# Altium footprint library DRV8849RHHR.PcbLib: 4 footprints
Each footprint in its own frame and in the unit in brackets; x right, y up, seen from the top. Pads: shape width x height; smd on the part's side, far side on the other; paste and mask are expansions set on the pad; w line width, h text height; cw(c..) or ccw(c..) is an arc to the next point about the centre after c.
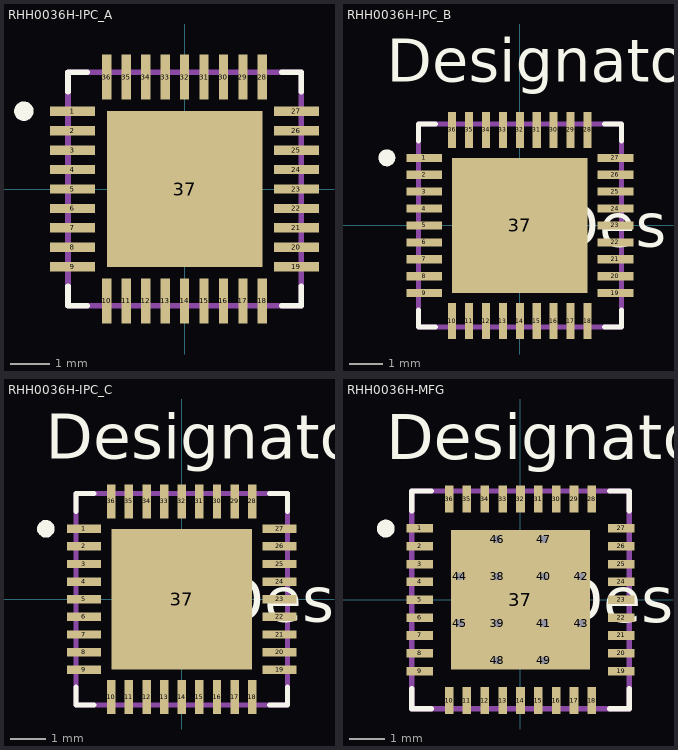
[diagram p0: the footprints below, top view; thin cyan lines are the x and y axes]

## RHH0036H-IPC_A [mm]
pads (37):
  rect 1.16x0.239 smd paste+0 mask+0: 1(-2.876,2) 2(-2.876,1.5) 3(-2.876,1) 4(-2.876,0.5) 5(-2.876,0) 6(-2.876,-0.5) 7(-2.876,-1) 8(-2.876,-1.5) 9(-2.876,-2) 19(2.876,-2) 20(2.876,-1.5) 21(2.876,-1) 22(2.876,-0.5) 23(2.876,0) 24(2.876,0.5) 25(2.876,1) 26(2.876,1.5) 27(2.876,2)
  rect 0.239x1.16 smd paste+0 mask+0: 10(-2,-2.876) 11(-1.5,-2.876) 12(-1,-2.876) 13(-0.5,-2.876) 14(0,-2.876) 15(0.5,-2.876) 16(1,-2.876) 17(1.5,-2.876) 18(2,-2.876) 28(2,2.876) 29(1.5,2.876) 30(1,2.876) 31(0.5,2.876) 32(0,2.876) 33(-0.5,2.876) 34(-1,2.876) 35(-1.5,2.876) 36(-2,2.876)
  rect 4x4 smd paste-1.987 mask+0: 37(0,0)
Top Overlay:
  circle w0.25: c-4.131,2 r0.125
  lines w0.15: -3,-2.5 -3,-3 -2.5,-3 ; -3,2.5 -3,3 -2.5,3 ; 2.5,-3 3,-3 3,-2.5 ; 2.5,3 3,3 3,2.5
Top Paste:
  region: -1.265,1.265 -1.265,-1.265 1.265,-1.265 1.265,1.265
Mechanical 13:
  lines w0.15: -3,-3 -3,3 3,3 3,-3 -3,-3
3D body "DRV8849RHHR.STEP": height 1, standoff 0, extent -3,-3 3,3

## RHH0036H-IPC_B [mm]
pads (37):
  rect 1.06x0.239 smd paste+0 mask+0: 1(-2.826,2) 2(-2.826,1.5) 3(-2.826,1) 4(-2.826,0.5) 5(-2.826,0) 6(-2.826,-0.5) 7(-2.826,-1) 8(-2.826,-1.5) 9(-2.826,-2) 19(2.826,-2) 20(2.826,-1.5) 21(2.826,-1) 22(2.826,-0.5) 23(2.826,0) 24(2.826,0.5) 25(2.826,1) 26(2.826,1.5) 27(2.826,2)
  rect 0.239x1.06 smd paste+0 mask+0: 10(-2,-2.826) 11(-1.5,-2.826) 12(-1,-2.826) 13(-0.5,-2.826) 14(0,-2.826) 15(0.5,-2.826) 16(1,-2.826) 17(1.5,-2.826) 18(2,-2.826) 28(2,2.826) 29(1.5,2.826) 30(1,2.826) 31(0.5,2.826) 32(0,2.826) 33(-0.5,2.826) 34(-1,2.826) 35(-1.5,2.826) 36(-2,2.826)
  rect 4x4 smd paste-1.987 mask+0: 37(0,0)
Top Overlay:
  circle w0.25: c-3.931,2 r0.125
  lines w0.15: -3,-2.5 -3,-3 -2.5,-3 ; -3,2.5 -3,3 -2.5,3 ; 2.5,-3 3,-3 3,-2.5 ; 2.5,3 3,3 3,2.5
  text "Designator107" at -3.937,4.242 h1.27
  text "RefDes" at -1.905,-0.635 h1.27
Top Paste:
  region: -1.265,1.265 -1.265,-1.265 1.265,-1.265 1.265,1.265
Mechanical 13:
  lines w0.15: -3,-3 -3,3 3,3 3,-3 -3,-3

## RHH0036H-IPC_C [mm]
pads (37):
  rect 0.96x0.239 smd paste+0 mask+0: 1(-2.776,2) 2(-2.776,1.5) 3(-2.776,1) 4(-2.776,0.5) 5(-2.776,0) 6(-2.776,-0.5) 7(-2.776,-1) 8(-2.776,-1.5) 9(-2.776,-2) 19(2.776,-2) 20(2.776,-1.5) 21(2.776,-1) 22(2.776,-0.5) 23(2.776,0) 24(2.776,0.5) 25(2.776,1) 26(2.776,1.5) 27(2.776,2)
  rect 0.239x0.96 smd paste+0 mask+0: 10(-2,-2.776) 11(-1.5,-2.776) 12(-1,-2.776) 13(-0.5,-2.776) 14(0,-2.776) 15(0.5,-2.776) 16(1,-2.776) 17(1.5,-2.776) 18(2,-2.776) 28(2,2.776) 29(1.5,2.776) 30(1,2.776) 31(0.5,2.776) 32(0,2.776) 33(-0.5,2.776) 34(-1,2.776) 35(-1.5,2.776) 36(-2,2.776)
  rect 4x4 smd paste-1.987 mask+0: 37(0,0)
Top Overlay:
  circle w0.25: c-3.856,2 r0.125
  lines w0.15: -3,-2.5 -3,-3 -2.5,-3 ; -3,2.5 -3,3 -2.5,3 ; 2.5,-3 3,-3 3,-2.5 ; 2.5,3 3,3 3,2.5
  text "Designator106" at -3.861,3.988 h1.27
  text "RefDes" at -1.905,-0.635 h1.27
Top Paste:
  region: -1.265,1.265 -1.265,-1.265 1.265,-1.265 1.265,1.265
Mechanical 13:
  lines w0.15: -3,-3 -3,3 3,3 3,-3 -3,-3

## RHH0036H-MFG [mm]
pads (49):
  rect 0.75x0.24 smd paste+0 mask+0: 1(-2.825,2) 2(-2.825,1.5) 3(-2.825,1) 4(-2.825,0.5) 5(-2.825,0) 6(-2.825,-0.5) 7(-2.825,-1) 8(-2.825,-1.5) 9(-2.825,-2) 19(2.825,-2) 20(2.825,-1.5) 21(2.825,-1) 22(2.825,-0.5) 23(2.825,0) 24(2.825,0.5) 25(2.825,1) 26(2.825,1.5) 27(2.825,2)
  rect 0.24x0.75 smd paste+0 mask+0: 10(-2,-2.825) 11(-1.5,-2.825) 12(-1,-2.825) 13(-0.5,-2.825) 14(0,-2.825) 15(0.5,-2.825) 16(1,-2.825) 17(1.5,-2.825) 18(2,-2.825) 28(2,2.825) 29(1.5,2.825) 30(1,2.825) 31(0.5,2.825) 32(0,2.825) 33(-0.5,2.825) 34(-1,2.825) 35(-1.5,2.825) 36(-2,2.825)
  rect 3.9x3.9 smd paste-1.937 mask+0: 37(0,0)
  round 0.5 / inner round 1.524 / far side round 0.5 hole 0.203 paste-2539.97 mask-0.241: 38(-0.655,0.655) 39(-0.655,-0.655) 40(0.655,0.655) 41(0.655,-0.655) 42(1.7,0.655) 43(1.7,-0.655) 44(-1.7,0.655) 45(-1.7,-0.655) 46(-0.655,1.7) 47(0.655,1.7) 48(-0.655,-1.7) 49(0.655,-1.7)
Top Overlay:
  circle w0.25: c-3.775,1.995 r0.125
  lines w0.15: -3.05,-2.495 -3.05,-3.05 -2.495,-3.05 ; -3.05,2.495 -3.05,3.05 -2.495,3.05 ; 2.495,-3.05 3.05,-3.05 3.05,-2.495 ; 2.495,3.05 3.05,3.05 3.05,2.495
  text "Designator105" at -3.759,3.937 h1.27
  text "RefDes" at -1.905,-0.635 h1.27
Top Paste:
  region: -1.865,0.805 -1.865,1.815 -1.815,1.865 -0.805,1.865 -0.755,1.815 -0.755,0.805 -0.805,0.755 -1.815,0.755
  region: -0.805,0.555 -0.755,0.505 -0.755,-0.505 -0.805,-0.555 -1.815,-0.555 -1.865,-0.505 -1.865,0.505 -1.815,0.555
  region: -0.805,-1.865 -1.815,-1.865 -1.865,-1.815 -1.865,-0.805 -1.815,-0.755 -0.805,-0.755 -0.755,-0.805 -0.755,-1.815
  region: 0.505,1.865 0.555,1.815 0.555,0.805 0.505,0.755 -0.505,0.755 -0.555,0.805 -0.555,1.815 -0.505,1.865
  region: -0.505,0.555 0.505,0.555 0.555,0.505 0.555,-0.505 0.505,-0.555 -0.505,-0.555 -0.555,-0.505 -0.555,0.505
  region: -0.505,-0.755 0.505,-0.755 0.555,-0.805 0.555,-1.815 0.505,-1.865 -0.505,-1.865 -0.555,-1.815 -0.555,-0.805
  region: 0.755,0.805 0.755,1.815 0.805,1.865 1.815,1.865 1.865,1.815 1.865,0.805 1.815,0.755 0.805,0.755
  region: 1.815,0.555 1.865,0.505 1.865,-0.505 1.815,-0.555 0.805,-0.555 0.755,-0.505 0.755,0.505 0.805,0.555
  region: 0.755,-1.815 0.755,-0.805 0.805,-0.755 1.815,-0.755 1.865,-0.805 1.865,-1.815 1.815,-1.865 0.805,-1.865
Mechanical 13:
  lines w0.15: -3.05,-3.05 3.05,-3.05 3.05,3.05 -3.05,3.05 -3.05,-3.05